# Altium footprint library FootPrintLib_12.PcbLib: 319 footprints (part 8 of 20)
Each footprint in its own frame and in the unit in brackets; x right, y up, seen from the top. Pads: shape width x height; smd on the part's side, far side on the other; paste and mask are expansions set on the pad; w line width, h text height; cw(c..) or ccw(c..) is an arc to the next point about the centre after c.
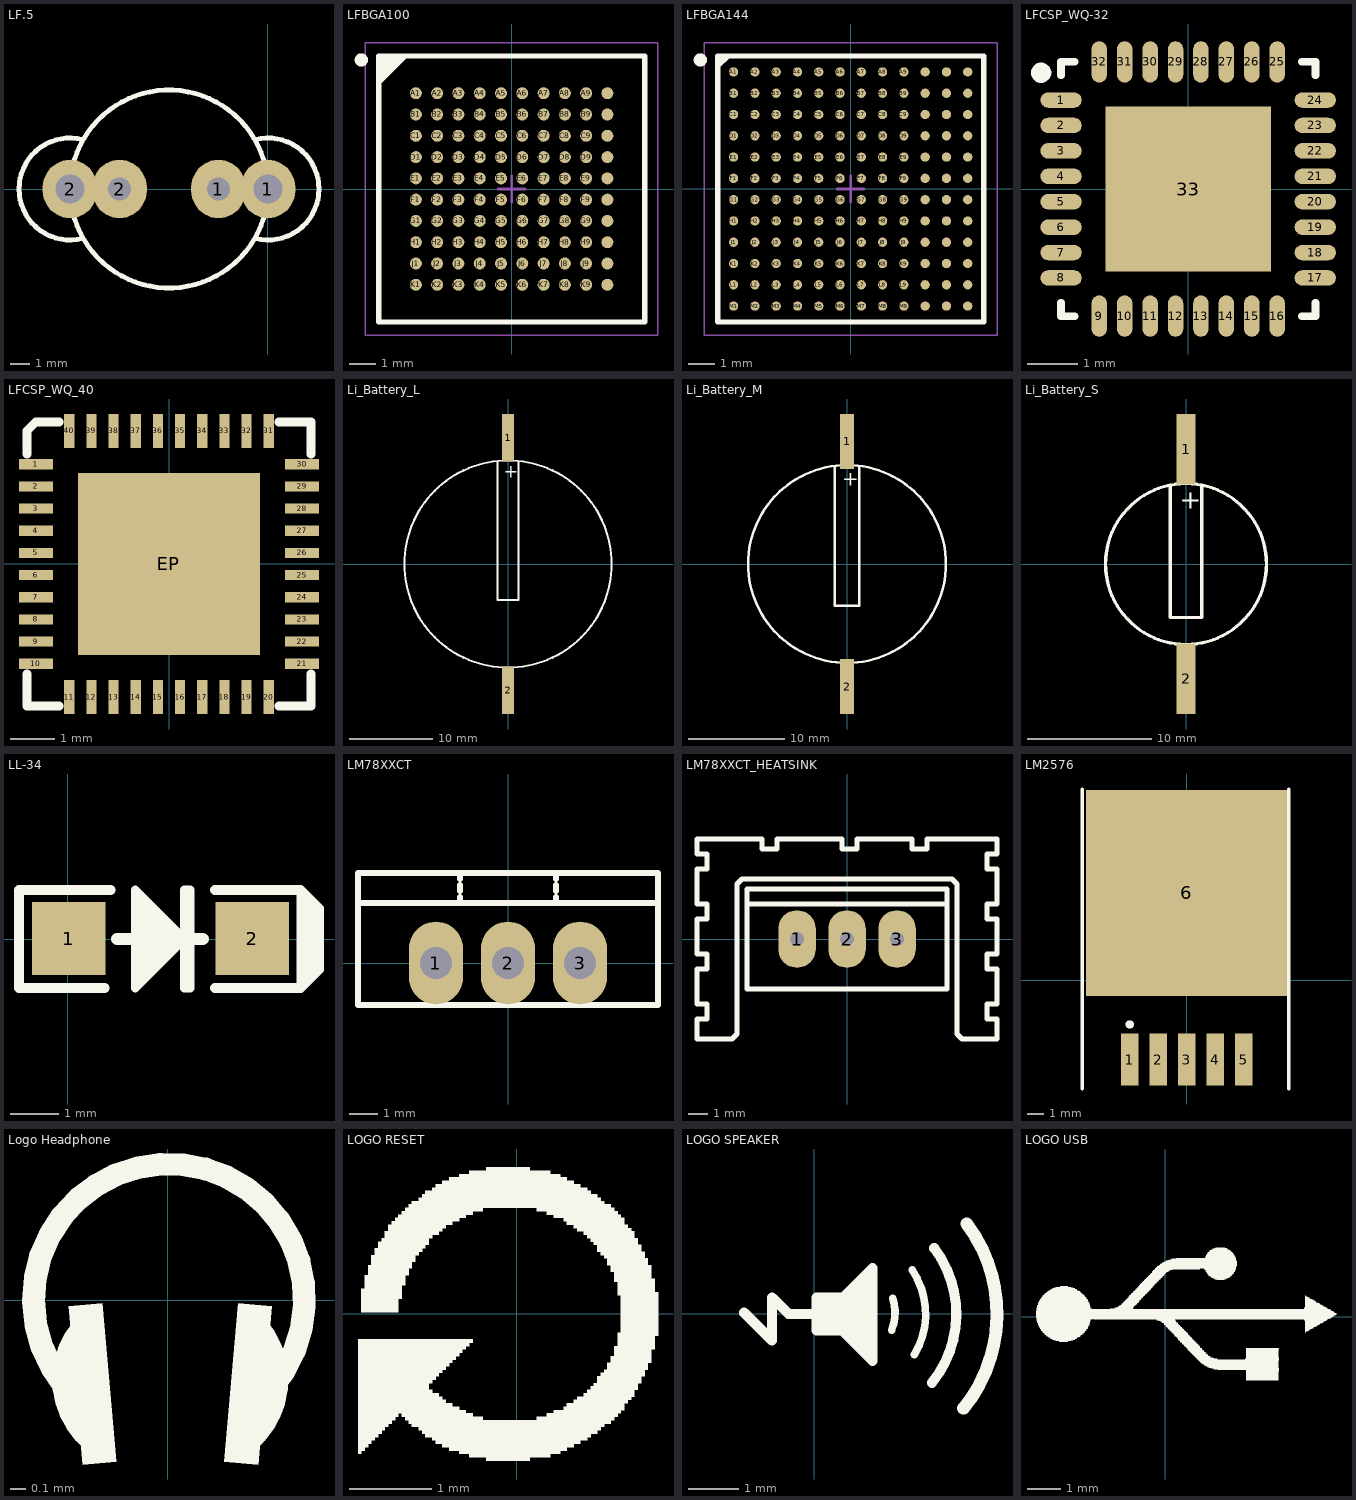
[diagram p7: the footprints below, top view; thin cyan lines are the x and y axes]

## LF.5 [mm]
pads (4):
  oval 2.8x3 hole 1.2: 1(-2.54,0) 2(-7.62,0)
  oval 2.8x3 hole 1.5: 1(0,0) 2(-10.16,0)
Top Overlay:
  circle w0.254: c-5.08,0 r5.08
  lines w0.254: -9.525,-2.54 cw(c-10.16,0) -9.525,2.54 ; -0.635,-2.54 ccw(c0,0) -0.635,2.54

## LFBGA100 [mm] "BGA, 100-Balls, Body 10x10mm, Pitch 0.8mm"
height 1.7
pads (100):
  round 0.45 smd: A1(-3.6,3.6) A2(-2.8,3.6) A3(-2,3.6) A4(-1.2,3.6) A5(-0.4,3.6) A6(0.4,3.6) A7(1.2,3.6) A8(2,3.6) A9(2.8,3.6) A10(3.6,3.6) B1(-3.6,2.8) B2(-2.8,2.8) B3(-2,2.8) B4(-1.2,2.8) B5(-0.4,2.8) B6(0.4,2.8) B7(1.2,2.8) B8(2,2.8) B9(2.8,2.8) B10(3.6,2.8) C1(-3.6,2) C2(-2.8,2) C3(-2,2) C4(-1.2,2) C5(-0.4,2) C6(0.4,2) C7(1.2,2) C8(2,2) C9(2.8,2) C10(3.6,2) D1(-3.6,1.2) D2(-2.8,1.2) D3(-2,1.2) D4(-1.2,1.2) D5(-0.4,1.2) D6(0.4,1.2) D7(1.2,1.2) D8(2,1.2) D9(2.8,1.2) D10(3.6,1.2) E1(-3.6,0.4) E2(-2.8,0.4) E3(-2,0.4) E4(-1.2,0.4) E5(-0.4,0.4) E6(0.4,0.4) E7(1.2,0.4) E8(2,0.4) E9(2.8,0.4) E10(3.6,0.4) F1(-3.6,-0.4) F2(-2.8,-0.4) F3(-2,-0.4) F4(-1.2,-0.4) F5(-0.4,-0.4) F6(0.4,-0.4) F7(1.2,-0.4) F8(2,-0.4) F9(2.8,-0.4) F10(3.6,-0.4) G1(-3.6,-1.2) G2(-2.8,-1.2) G3(-2,-1.2) G4(-1.2,-1.2) G5(-0.4,-1.2) G6(0.4,-1.2) G7(1.2,-1.2) G8(2,-1.2) G9(2.8,-1.2) G10(3.6,-1.2) H1(-3.6,-2) H2(-2.8,-2) H3(-2,-2) H4(-1.2,-2) H5(-0.4,-2) H6(0.4,-2) H7(1.2,-2) H8(2,-2) H9(2.8,-2) H10(3.6,-2) J1(-3.6,-2.8) J2(-2.8,-2.8) J3(-2,-2.8) J4(-1.2,-2.8) J5(-0.4,-2.8) J6(0.4,-2.8) J7(1.2,-2.8) J8(2,-2.8) J9(2.8,-2.8) J10(3.6,-2.8) K1(-3.6,-3.6) K2(-2.8,-3.6) K3(-2,-3.6) K4(-1.2,-3.6) K5(-0.4,-3.6) K6(0.4,-3.6) K7(1.2,-3.6) K8(2,-3.6) K9(2.8,-3.6) K10(3.6,-3.6)
Top Overlay:
  circle w0.25: c-5.65,4.85 r0.125
  region: -4,5 -5,4 -5,5
  lines w0.2: -5,4 -4,5 ; -5,-5 5,-5 5,5 -5,5 -5,-5
Mechanical 13:
  lines w0.1: -5,-5 5,-5 5,5 -5,5 -5,-5
Mechanical 15:
  lines w0.05: -5.5,-5.5 5.5,-5.5 5.5,5.5 -5.5,5.5 -5.5,-5.5
  lines w0.1: -0.5,0 0.5,0 ; 0,-0.5 0,0.5
3D body: height 1.7, standoff 0.27, extent -5,-5 5,5

## LFBGA144 [mm] "BGA, 144-Balls, Body 10x10mm, Pitch 0.8mm"
height 1.7
pads (144):
  round 0.35 smd: A1(-4.4,4.4) A2(-3.6,4.4) A3(-2.8,4.4) A4(-2,4.4) A5(-1.2,4.4) A6(-0.4,4.4) A7(0.4,4.4) A8(1.2,4.4) A9(2,4.4) A10(2.8,4.4) A11(3.6,4.4) A12(4.4,4.4) B1(-4.4,3.6) B2(-3.6,3.6) B3(-2.8,3.6) B4(-2,3.6) B5(-1.2,3.6) B6(-0.4,3.6) B7(0.4,3.6) B8(1.2,3.6) B9(2,3.6) B10(2.8,3.6) B11(3.6,3.6) B12(4.4,3.6) C1(-4.4,2.8) C2(-3.6,2.8) C3(-2.8,2.8) C4(-2,2.8) C5(-1.2,2.8) C6(-0.4,2.8) C7(0.4,2.8) C8(1.2,2.8) C9(2,2.8) C10(2.8,2.8) C11(3.6,2.8) C12(4.4,2.8) D1(-4.4,2) D2(-3.6,2) D3(-2.8,2) D4(-2,2) D5(-1.2,2) D6(-0.4,2) D7(0.4,2) D8(1.2,2) D9(2,2) D10(2.8,2) D11(3.6,2) D12(4.4,2) E1(-4.4,1.2) E2(-3.6,1.2) E3(-2.8,1.2) E4(-2,1.2) E5(-1.2,1.2) E6(-0.4,1.2) E7(0.4,1.2) E8(1.2,1.2) E9(2,1.2) E10(2.8,1.2) E11(3.6,1.2) E12(4.4,1.2) F1(-4.4,0.4) F2(-3.6,0.4) F3(-2.8,0.4) F4(-2,0.4) F5(-1.2,0.4) F6(-0.4,0.4) F7(0.4,0.4) F8(1.2,0.4) F9(2,0.4) F10(2.8,0.4) F11(3.6,0.4) F12(4.4,0.4) G1(-4.4,-0.4) G2(-3.6,-0.4) G3(-2.8,-0.4) G4(-2,-0.4) G5(-1.2,-0.4) G6(-0.4,-0.4) G7(0.4,-0.4) G8(1.2,-0.4) G9(2,-0.4) G10(2.8,-0.4) G11(3.6,-0.4) G12(4.4,-0.4) H1(-4.4,-1.2) H2(-3.6,-1.2) H3(-2.8,-1.2) H4(-2,-1.2) H5(-1.2,-1.2) H6(-0.4,-1.2) H7(0.4,-1.2) H8(1.2,-1.2) H9(2,-1.2) H10(2.8,-1.2) H11(3.6,-1.2) H12(4.4,-1.2) J1(-4.4,-2) J2(-3.6,-2) J3(-2.8,-2) J4(-2,-2) J5(-1.2,-2) J6(-0.4,-2) J7(0.4,-2) J8(1.2,-2) J9(2,-2) J10(2.8,-2) J11(3.6,-2) J12(4.4,-2) K1(-4.4,-2.8) K2(-3.6,-2.8) K3(-2.8,-2.8) K4(-2,-2.8) K5(-1.2,-2.8) K6(-0.4,-2.8) K7(0.4,-2.8) K8(1.2,-2.8) K9(2,-2.8) K10(2.8,-2.8) K11(3.6,-2.8) K12(4.4,-2.8) L1(-4.4,-3.6) L2(-3.6,-3.6) L3(-2.8,-3.6) L4(-2,-3.6) L5(-1.2,-3.6) L6(-0.4,-3.6) L7(0.4,-3.6) L8(1.2,-3.6) L9(2,-3.6) L10(2.8,-3.6) L11(3.6,-3.6) L12(4.4,-3.6) M1(-4.4,-4.4) M2(-3.6,-4.4) M3(-2.8,-4.4) M4(-2,-4.4) M5(-1.2,-4.4) M6(-0.4,-4.4) M7(0.4,-4.4) M8(1.2,-4.4) M9(2,-4.4) M10(2.8,-4.4) M11(3.6,-4.4) M12(4.4,-4.4)
Top Overlay:
  circle w0.25: c-5.65,4.85 r0.125
  region: -4.613,5 -5,4.613 -5,5
  lines w0.2: -5,4.613 -4.613,5 ; -5,-5 5,-5 5,5 -5,5 -5,-5
Mechanical 13:
  lines w0.1: -5,-5 5,-5 5,5 -5,5 -5,-5
Mechanical 15:
  lines w0.05: -5.5,-5.5 5.5,-5.5 5.5,5.5 -5.5,5.5 -5.5,-5.5
  lines w0.1: -0.5,0 0.5,0 ; 0,-0.5 0,0.5
3D body: height 1.7, standoff 0.21, extent -5,-5 5,5

## LFCSP_WQ-32 [mil]
pads (33):
  oval 32x12 smd: 1(-98.43,68.9) 2(-98.43,49.21) 3(-98.43,29.53) 4(-98.43,9.84) 5(-98.43,-9.84) 6(-98.43,-29.53) 7(-98.43,-49.21) 8(-98.43,-68.9) 17(98.43,-68.9) 18(98.43,-49.21) 19(98.43,-29.53) 20(98.43,-9.84) 21(98.43,9.84) 22(98.43,29.53) 23(98.43,49.21) 24(98.43,68.9)
  oval 12x32 smd: 9(-68.9,-98.43) 10(-49.21,-98.43) 11(-29.53,-98.43) 12(-9.84,-98.43) 13(9.84,-98.43) 14(29.53,-98.43) 15(49.21,-98.43) 16(68.9,-98.43) 25(68.9,98.43) 26(49.21,98.43) 27(29.53,98.43) 28(9.84,98.43) 29(-9.84,98.43) 30(-29.53,98.43) 31(-49.21,98.43) 32(-68.9,98.43)
  rect 128x128 smd mask-63.5: 33(0,0)
Top Overlay:
  circle w7.87: c-113.94,90 r3.94
  lines w6: -98.5,-88 -98.5,-98.5 -88,-98.5 ; -98.5,88 -98.5,98.5 -88,98.5 ; 88,-98.5 98.5,-98.5 98.5,-88 ; 88,98.5 98.5,98.5 98.5,88

## LFCSP_WQ_40 [mm]
height 2.54
pads (41):
  rect 0.762x0.23 smd: 1(-3,2.25) 2(-3,1.75) 3(-3,1.25) 4(-3,0.75) 5(-3,0.25) 6(-3,-0.25) 7(-3,-0.75) 8(-3,-1.25) 9(-3,-1.75) 10(-3,-2.25) 21(3,-2.25) 22(3,-1.75) 23(3,-1.25) 24(3,-0.75) 25(3,-0.25) 26(3,0.25) 27(3,0.75) 28(3,1.25) 29(3,1.75) 30(3,2.25)
  rect 0.23x0.762 smd: 11(-2.25,-3) 12(-1.75,-3) 13(-1.25,-3) 14(-0.75,-3) 15(-0.25,-3) 16(0.25,-3) 17(0.75,-3) 18(1.25,-3) 19(1.75,-3) 20(2.25,-3) 31(2.25,3) 32(1.75,3) 33(1.25,3) 34(0.75,3) 35(0.25,3) 36(-0.25,3) 37(-0.75,3) 38(-1.25,3) 39(-1.75,3) 40(-2.25,3)
  rect 4.1x4.1 smd: EP(0,0)
Top Overlay:
  lines w0.2: -3.2,-2.48 -3.2,-3.2 -2.48,-3.2 ; -3.2,2.48 -3.2,3 -3,3.2 -2.48,3.2 ; 2.48,-3.2 3.2,-3.2 3.2,-2.48 ; 2.48,3.2 3.2,3.2 3.2,2.48
3D body "SW3dPS-CP-40-4.STEP": height 1.01, standoff -0.08, extent -3.01,-3.023 3.01,2.997

## Li_Battery_L [mm]
pads (2):
  rect 1.5x5.7 smd: 1(0,15.24) 2(0,-15.24)
Top Overlay:
  circle w0.254: c0,0 r12.5
  lines w0.254: -1.27,12.319 -1.27,-4.318 1.27,-4.318 1.27,12.319
  text "+" at -0.508,10.414 h1.52

## Li_Battery_M [mm]
pads (2):
  rect 1.5x5.7 smd: 1(0,12.7) 2(0,-12.7)
Top Overlay:
  circle w0.254: c0,0 r10.25
  lines w0.254: -1.27,10.16 -1.27,-4.318 1.27,-4.318 1.27,10.16
  text "+" at -0.508,8.128 h1.52

## Li_Battery_S [mm]
pads (2):
  rect 1.5x5.7 smd: 1(0,9.271) 2(0,-9.271)
Top Overlay:
  circle w0.254: c0,0 r6.5
  lines w0.254: -1.27,6.223 -1.27,-4.318 1.27,-4.318 1.27,6.35
  text "+" at -0.508,4.445 h1.52

## LL-34 [mil]
pads (2):
  rect 60x60 smd: 1(0.45,0.4) 2(150.45,0.4)
Top Overlay:
  lines w7: 60,15 60,-30 60,30 ; 65,-25 65,25 ; 70,-25 70,25 ; 75,-20 75,20 ; 80,-10 80,10 ; 85,-10 85,10 ; 190,-40 190,40 ; 195,-30 195,30 ; 200,-25 200,30 ; 55,-40 95,0 55,40 55,-40 ; 95,-40 95,40 100,40 100,-40 95,-40
  lines w8: 30,-40 -40,-40 -40,40 35,40 ; 120,-40 190,-40 205,-25 205,25 190,40 120,40
  lines w10: 40,0 110,0

## LM78XXCT [mil]
pads (3):
  oval 75x115 hole 45: 1(-100,0) 2(0,0) 3(100,0)
Top Overlay:
  lines w7.87: -66.67,83.33 -66.67,91.67 ; -66.67,100 -66.67,108.33 ; -66.67,116.67 -66.67,125 ; 66.67,83.33 66.67,91.67 ; 66.67,100 66.67,108.33 ; 66.67,116.67 66.67,125 ; -208.33,83.33 208.33,83.33 ; -208.33,83.33 -208.33,-58.33 208.33,-58.33 208.33,83.33 ; -208.33,83.33 -208.33,125 208.33,125 208.33,83.33

## LM78XXCT_HEATSINK [mil]
pads (3):
  oval 75x115 hole 28: 1(-100,0) 2(0,0) 3(100,0)
Top Overlay:
  lines w10: -200,70 200,70 ; -300,-200 -300,-160 -280,-160 -280,-130 -300,-130 -300,-60 -280,-60 -280,-30 -300,-30 -300,40 -280,40 -280,70 -300,70 -300,140 -280,140 -280,170 -300,170 -300,200 -170,200 -170,180 -140,180 -140,200 -10,200 -10,180 20,180 20,200 130,200 130,180 160,180 160,200 300,200 300,170 280,170 280,140 300,140 300,70 280,70 280,40 300,40 300,-30 280,-30 280,-60 300,-60 300,-130 280,-130 280,-160 300,-160 300,-200 250,-200 230,-200 220,-190 220,110 210,120 -210,120 -220,110 -220,-190 -230,-200 -300,-200 ; -200,-100 -200,100 200,100 200,-100 -200,-100

## LM2576 [mm]
pads (6):
  rect 1.05x3.1 smd: 1(-3.4,-4.725) 2(-1.7,-4.725) 3(0,-4.725) 4(1.7,-4.725) 5(3.4,-4.725)
  rect 12x12.3 smd: 6(0,5.225)
Top Overlay:
  circle w0.25: c-3.4,-2.625 r0.125
  lines w0.2: -6.223,-6.477 -6.223,11.43 ; 6.096,-6.477 6.096,11.43

## Logo Headphone [mm]
Top Overlay:
  region: -0.436,-0.018 -0.663,-0.038 -0.571,-1.101 -0.343,-1.081
  region: 0.376,-1.081 0.604,-1.101 0.697,-0.038 0.469,-0.018
  lines w0.152: -0.692,-0.567 cw(c0.008,0.005) 0.686,-0.594
  lines w0.203: -0.551,-0.203 ccw(c-0.162,-0.53) -0.474,-0.93 ; 0.508,-0.93 ccw(c0.195,-0.53) 0.584,-0.203

## LOGO RESET [mm]
Top Overlay:
  drawing of 1 lines, arcs and shapes, not listed

## LOGO SPEAKER [mm]
Top Overlay:
  lines w0.152: 1.552,-0.324 ccw(c0.686,0.025) 1.574,0.314 ; 1.964,0.879 cw(c0.66,0) 2.008,-0.81
  lines w0.203: -1.397,0.025 -0.838,-0.533 -0.838,0.33 -0.508,0 0,0 ; 0.102,-0.178 0.508,-0.178 ; 0.102,-0.025 0.559,-0.025 ; 0.102,0.152 0.66,0.152 ; 0.508,-0.33 0.051,-0.33 0.051,0.33 0.559,0.33 0.559,-0.33 1.168,-0.94 1.168,0.914 0.559,0.305 ; 0.914,-0.432 0.914,0.432 ; 0.965,-0.508 0.737,-0.279 0.737,0.279 1.067,0.61 1.067,-0.66 ; 2.359,-1.376 ccw(c0.66,0) 2.406,1.315
  lines w0.254: 2.991,-1.888 ccw(c0.66,0) 3.056,1.805

## LOGO USB [mm]
Top Overlay:
  drawing of 1 lines, arcs and shapes, not listed